# Altium footprint library TIE_2023_PcbLib.PcbLib: 17 footprints (part 2 of 2)
Each footprint in its own frame and in the unit in brackets; x right, y up, seen from the top. Pads: shape width x height; smd on the part's side, far side on the other; paste and mask are expansions set on the pad; w line width, h text height; cw(c..) or ccw(c..) is an arc to the next point about the centre after c.
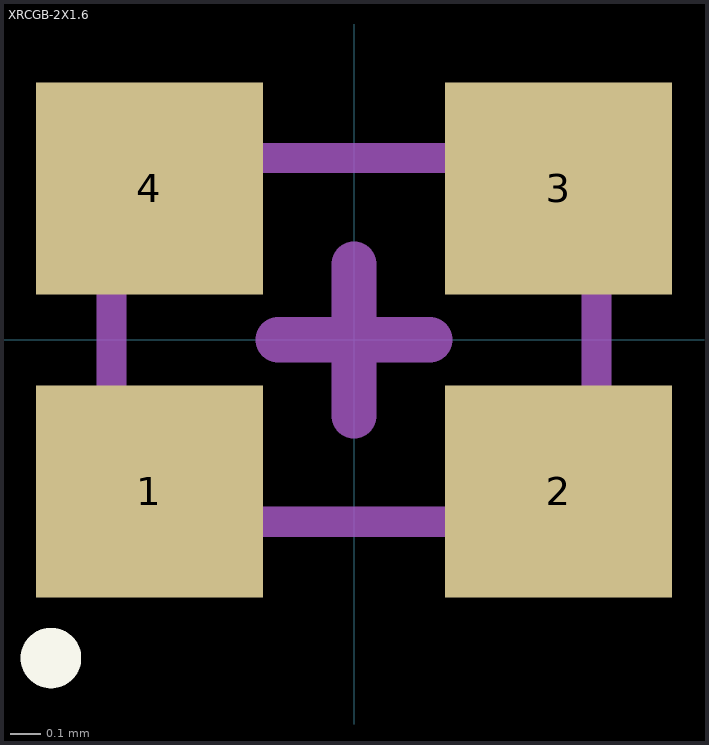
[diagram p1: the footprint, top view; thin cyan lines are the x and y axes]

## XRCGB-2X1.6 [mm] "32MHz Crystal"
pads (4):
  rect 0.75x0.7 smd mask+0.05: 1(-0.675,-0.5) 2(0.675,-0.5) 3(0.675,0.5) 4(-0.675,0.5)
Top Overlay:
  lines w0.1: -1,-1.1 ccw(c-1,-1.05) -1,-1 ccw(c-1,-1.05) -1,-1.1
Top Component Center:
  lines w0.15: -0.25,0 0.25,0 ; 0,-0.25 0,0.25
Top Assembly:
  lines w0.1: -0.8,-0.6 0.8,-0.6 0.8,0.6 -0.8,0.6 -0.8,-0.6
  text ".Designator" at -0.475,-0.025 h0.3
3D body "US3200005Z.stp": height 0.5, standoff 0, extent -0.8,-0.64 0.8,0.64